# Altium schematic symbol library TMUX1111PWR.SchLib: 1 symbol
Pins are listed as number, name and electrical type; pins without a type are passive.

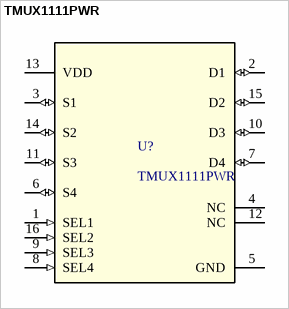
[diagram p0: symbol TMUX1111PWR]

## TMUX1111PWR
designator U?
3-pA on-state leakage current, 5-V, 1:1 (SPST), 4-channel precision switch (4 active low) 16-TSSOP -40 to 125; Manufacturer_Name: Texas Instruments; TYPE: TYPE; RefDes: RefDes; Copyright: Copyright (C) 2026 Ultra Librarian. All rights reserved.; Manufacturer_Part_Number: TMUX1111PWR; Datasheet: https://www.ti.com/lit/gpn/tmux1111
footprint PW0016A_N
pins: 1 SEL1 (in), 2 D1 (io), 3 S1 (io), 4 NC, 5 GND (power), 6 S4 (io), 7 D4 (io), 8 SEL4 (in), 9 SEL3 (in), 10 D3 (io), 11 S3 (io), 12 NC, 13 VDD (power), 14 S2 (io), 15 D2 (io), 16 SEL2 (in)